# Altium footprint library 32k243-40ml5.PcbLib: 1 footprints
Each footprint in its own frame and in the unit in brackets; x right, y up, seen from the top. Pads: shape width x height; smd on the part's side, far side on the other; paste and mask are expansions set on the pad; w line width, h text height; cw(c..) or ccw(c..) is an arc to the next point about the centre after c.
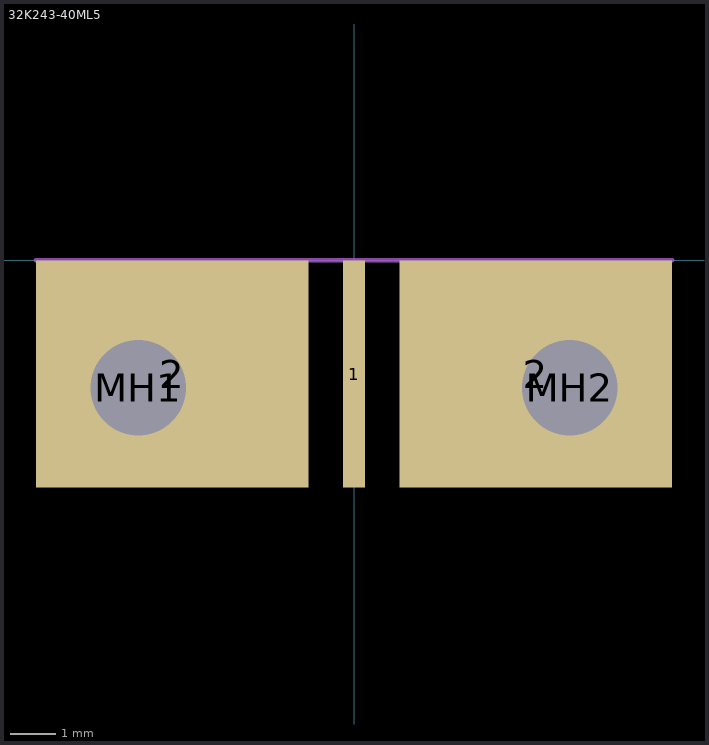
[diagram p0: the footprint, top view; thin cyan lines are the x and y axes]

## 32K243-40ML5 [mm]
pads (5):
  rect 0.48x5 smd paste+0: 1(0,-2.5)
  rect 6x5 smd paste+0: 2(-4,-2.5) 2(4,-2.5)
  round 2.1 hole 2.1 unplated: MH1(-4.75,-2.8) MH2(4.75,-2.8)
Mechanical 3:
  lines w0.1: -7,0 7,0
3D body "32k243-40mxx_shrink.stp": height 4.88, standoff -5.12, extent -7,-5 7,9.5